# Altium schematic symbol library Schlib1.SchLib: 11 symbols
Pins are listed as number, name and electrical type; pins without a type are passive.

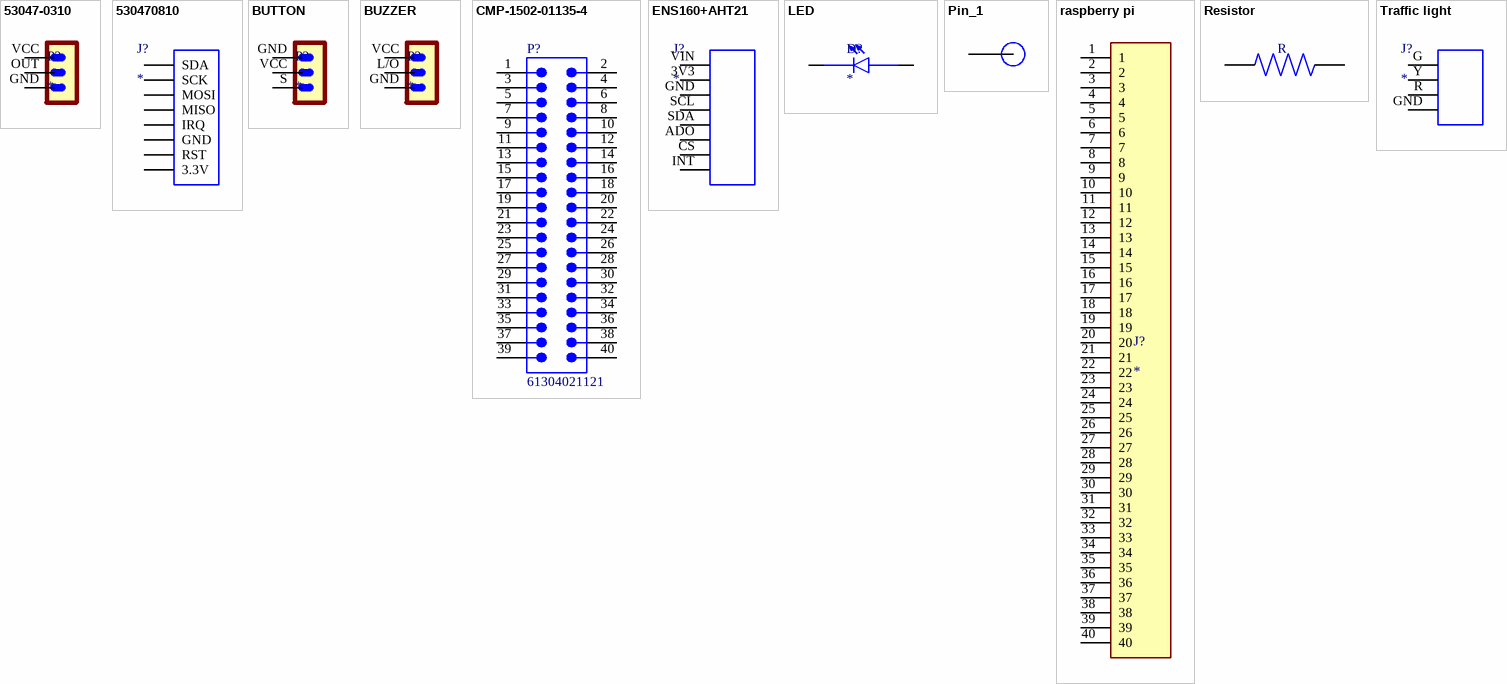
[diagram p0: symbols 53047-0310 to Traffic light]

## 53047-0310
designator P?
Connector Header Through Hole 3 position 0.049 (1.25mm); MF: Molex; MP: 53047-0310; Package: None; Price: None; Value: *; SnapEDA_Link: https://www.snapeda.com/parts/53047-0310/Molex/view-part/?ref=snap; Availability: In Stock; Check_prices: https://www.snapeda.com/parts/53047-0310/Molex/view-part/?ref=eda
footprint SR505
pins: GND 3, OUT 2, VCC OUT

## 530470810
designator J?
MP: 530470810; Package: None; Price: None; Value: *; Availability: Unavailable
footprint SPI
pins: 1 SDA, 2 SCK, 3 MOSI, 4 MISO, 5 IRQ, 6 GND, 7 RST, 8 3.3V

## BUTTON
designator P?
Connector Header Through Hole 3 position 0.049 (1.25mm); MF: Molex; MP: 53047-0310; Package: None; Price: None; Value: *; SnapEDA_Link: https://www.snapeda.com/parts/53047-0310/Molex/view-part/?ref=snap; Availability: In Stock; Check_prices: https://www.snapeda.com/parts/53047-0310/Molex/view-part/?ref=eda
footprint Button
pins: GND OUT, S 3, VCC 2

## BUZZER
designator P?
Connector Header Through Hole 3 position 0.049 (1.25mm); MF: Molex; MP: 53047-0310; Package: None; Price: None; Value: *; SnapEDA_Link: https://www.snapeda.com/parts/53047-0310/Molex/view-part/?ref=snap; Availability: In Stock; Check_prices: https://www.snapeda.com/parts/53047-0310/Molex/view-part/?ref=eda
footprint BUZZER
pins: GND 3, L/O 2, VCC OUT

## CMP-1502-01135-4
designator P?, comment 61304021121
WR-PHD Straight Male, PCB Header, Through Hole, 2 Rows, 40 Contacts, 2.54mm Pitch; Number of Positions: 40; Contact Resistance: 20mΩ; Connector Type: Male Pin; Voltage Rating: 250V; Current Rating: 3A; Color: Black; Number of Pins: 40; Orientation: Vertical; Number of Rows: 2; Number of Contacts: 40; Gender: Male; Contact Plating: Gold; Pitch: 2.54mm; Contact Material: Gold; RoHS: Compliant; Min Operating Temperature: -40°C; Operating Supply Voltage: 250V; Row Spacing: 2.54mm; Contact Mating Length: 5.9944mm; Packaging: Bulk; Lead Pitch: 2.54mm; Height: 8.89mm; Max Operating Temperature: 105°C; Mount: Through Hole; Termination: Solder
footprint 61304021121 (Pin Header, pitch 2.54 mm, THT, Vertical, dual row, 40p)
pins: 1, 2, 3, 4, 5, 6, 7, 8, 9, 10, 11, 12, 13, 14, 15, 16, 17, 18, 19, 20, 21, 22, 23, 24, 25, 26, 27, 28, 29, 30, 31, 32, 33, 34, 35, 36, 37, 38, 39, 40

## ENS160+AHT21
designator J?
MP: 530470810; Package: None; Price: None; Value: *; Availability: Unavailable
footprint ENS160+AHT21
pins: 3V3 2, ADO 6, CS 7, GND 3, INT 8, SCL 4, SDA 5, VIN 1

## LED
designator D?
Red 617nm LED Indication - Discrete 2V Radial; MP: WP7113ID; MF: Kingbright; Price: None; Package: Radial Kingbright; Check_prices: https://www.snapeda.com/parts/WP7113ID/Kingbright/view-part/?ref=eda; Purchase-URL: https://pricing.snapeda.com/search/part/WP7113ID/?ref=eda; Availability: In Stock; Value: *; SnapEDA_Link: https://www.snapeda.com/parts/WP7113ID/Kingbright/view-part/?ref=snap
footprint LED_WP7113ID
pins: A, C

## Pin_1
designator *  (value not drawn)
pins: Pin_1

## raspberry pi
designator J?
MP: 6-103166-8; Package: None; Price: None; Value: *; Availability: Unavailable
footprint raspberry pi
pins: 1, 2, 3, 4, 5, 6, 7, 8, 9, 10, 11, 12, 13, 14, 15, 16, 17, 18, 19, 20, 21, 22, 23, 24, 25, 26, 27, 28, 29, 30, 31, 32, 33, 34, 35, 36, 37, 38, 39, 40

## Resistor
designator R  (value not drawn)
25.5 kOhms Â±1% 0.25W, 1/4W Through Hole Resistor Axial - Metal Film; MF: Yageo; MP: MFR-25FBF52-25K5; SnapEDA_Link: https://www.snapeda.com/parts/MFR-25FBF52-25K5/Yageo/view-part/?ref=snap; Package: RADIAL-2 YAGEO; Value: *; Check_prices: https://www.snapeda.com/parts/MFR-25FBF52-25K5/Yageo/view-part/?ref=eda
footprint RESAD1100W55L680D260
pins: 1, 2

## Traffic light
designator J?
2.50mm Pitch SPOXâ„¢ Wire-to-Board Header, Vertical, Shrouded, 4 Circuits, Tin (Sn) Plating; MF: Molex; MP: 22035045; SnapEDA_Link: https://www.snapeda.com/parts/22035045/Molex/view-part/?ref=snap; Package: None; Value: *; Check_prices: https://www.snapeda.com/parts/22035045/Molex/view-part/?ref=eda
footprint Traffic light
pins: G 1, GND 4, R 3, Y 2